# EAGLE library part MCP1725-3302E_SNVAO (library MCP1725-3302E_SNVAO)
Linear Voltage Regulator IC Output SOIC-8 Fixed -40C to +125C 3.3V Source: Datasheet <https://ww1.microchip.com/downloads/aemDocuments/documents/APID/ProductDocuments/DataSheets/MCP1725-500-mA,-Low-Voltage,-Low-Quiescent-Current-LDO-Regulator-20002026C.pdf>
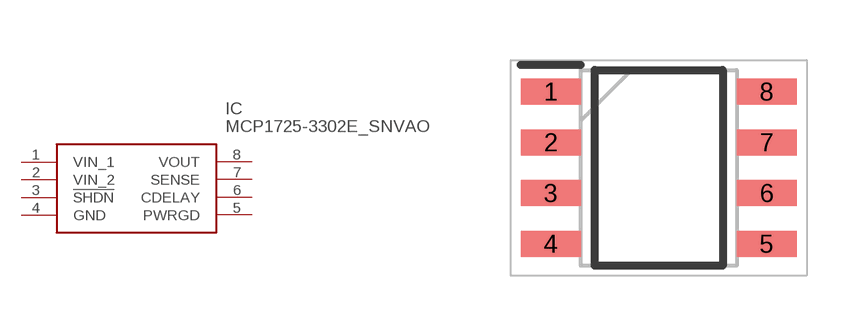
[diagram p0: symbol with the pads of SOIC127P600X175-8N; footprint SOIC127P600X175-8N]

Designator prefix IC

## MCP1725-3302E_SNVAO (Description: Linear Voltage Regulator IC Output SOIC-8 Fixed -40C to +125C 3.3V; Height: 1.75mm; Manufacturer_Name: Microchip; Manufacturer_Part_Number: MCP1725-3302E/SNVAO)  [SOIC127P600X175-8N]
1  VIN_1
2  VIN_2
3  !SHDN
4  GND
5  PWRGD
6  CDELAY
7  SENSE
8  VOUT

## Footprint SOIC127P600X175-8N (pad centres in mm)
8-LEAD PLASTIC SMALL OUTLINE(SN)-Narrow, 3.90 mm Body [SOIC]
smd 1.5 x 0.65: 1 -2.7,1.905; 2 -2.7,0.635; 3 -2.7,-0.635; 4 -2.7,-1.905; 5 2.7,-1.905; 6 2.7,-0.635; 7 2.7,0.635; 8 2.7,1.905